# Altium schematic symbol library RNCF0402DTE1K50.SchLib: 1 symbol
Pins are listed as number, name and electrical type; pins without a type are passive.

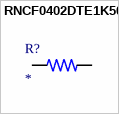
[diagram p0: symbol RNCF0402DTE1K50]

## RNCF0402DTE1K50
designator R?
1.5 kOhms ±0.5% 0.1W, 1/10W Chip Resistor 0402 (1005 Metric) Automotive AEC-Q200 Thin Film; MP: RNCF0402DTE1K50; Package: None; Price: None; Value: *; Availability: Unavailable
footprint RESC1005X35N
pins: 1, 2